# Altium footprint library MainController.PcbLib: 68 footprints (part 2 of 5)
Each footprint in its own frame and in the unit in brackets; x right, y up, seen from the top. Pads: shape width x height; smd on the part's side, far side on the other; paste and mask are expansions set on the pad; w line width, h text height; cw(c..) or ccw(c..) is an arc to the next point about the centre after c.
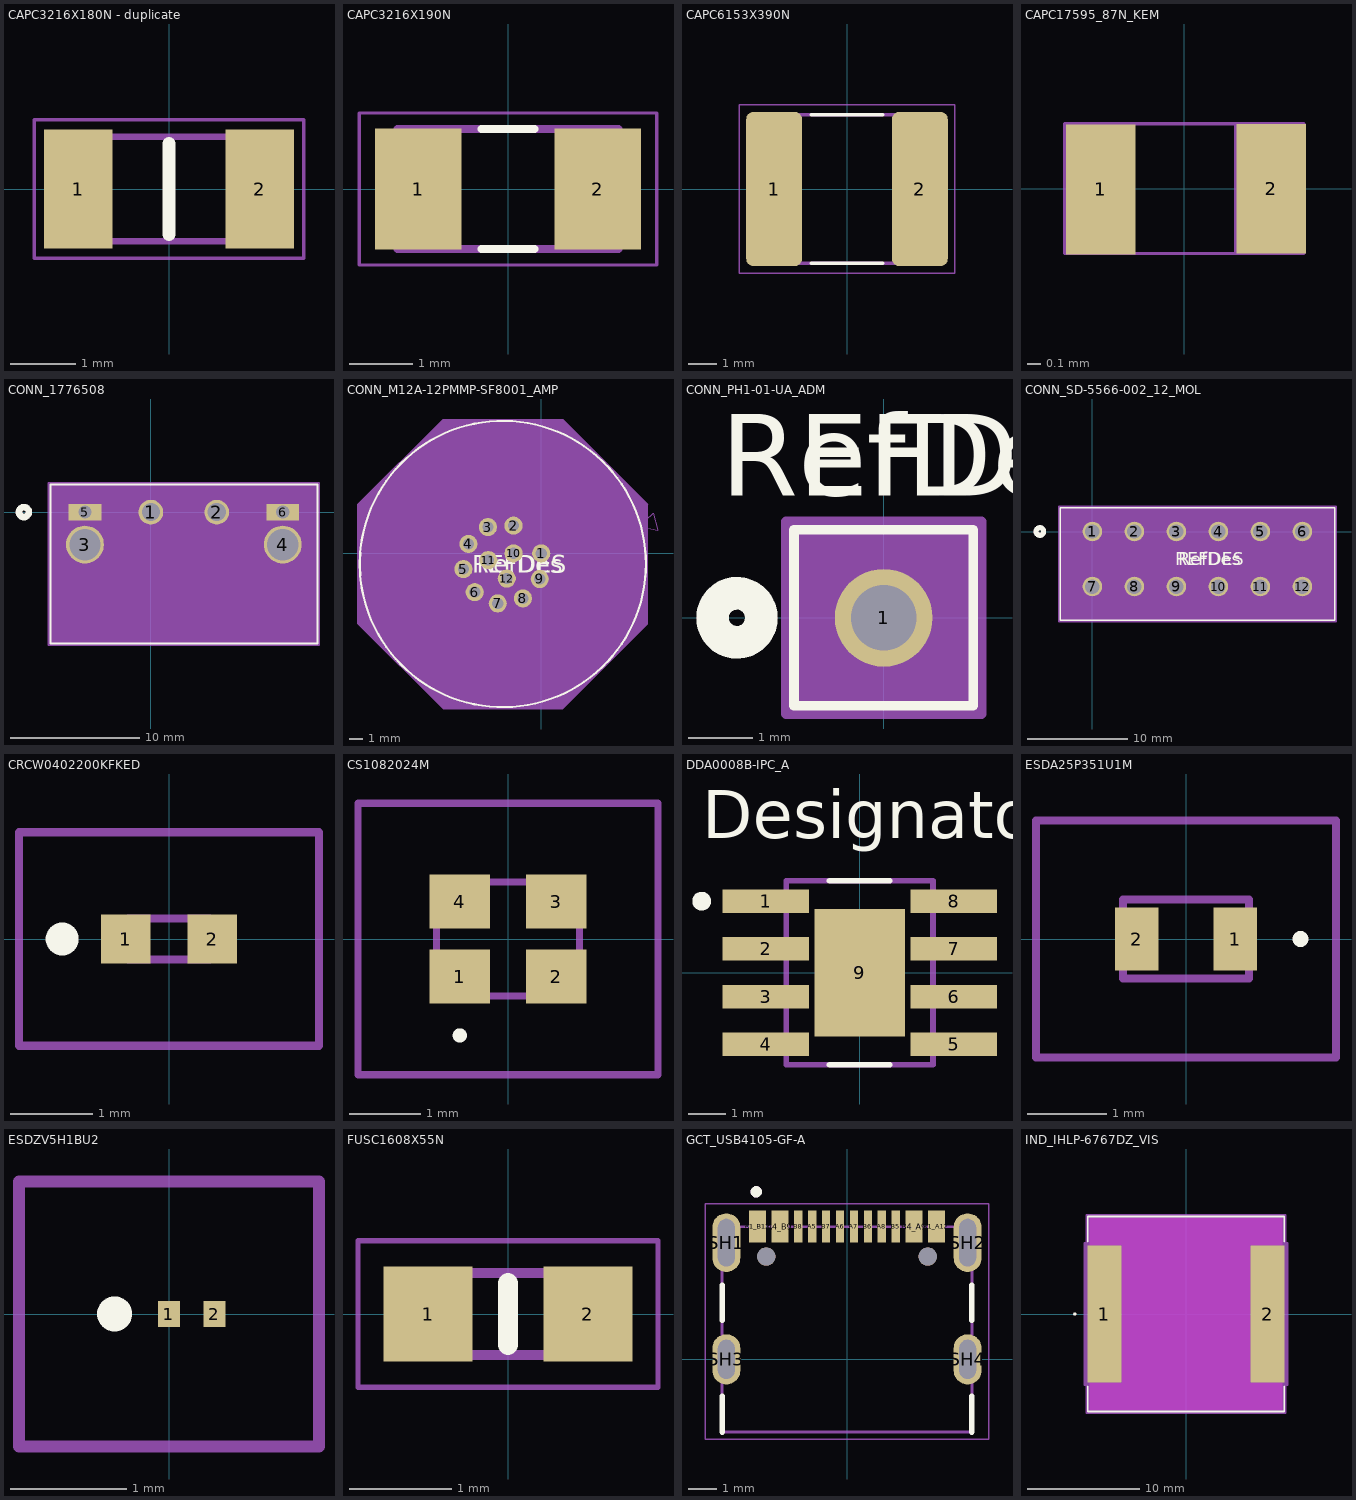
[diagram p1: the footprints below, top view; thin cyan lines are the x and y axes]

## CAPC3216X180N - duplicate [mm]
pads (2):
  rect 1.05x1.82 smd: 1(-1.39,0) 2(1.39,0)
Top Overlay:
  lines w0.2: 0,-0.7 0,0.7
Mechanical 13:
  lines w0.1: -1.6,-0.8 -1.6,0.8 1.6,0.8 1.6,-0.8 -1.6,-0.8
Mechanical 15:
  lines w0.05: -2.065,-1.06 -2.065,1.06 2.065,1.06 2.065,-1.06 -2.065,-1.06
3D body "CL31A106MAHNNNE.stp": height 1.8, standoff 0, extent -1.6,-0.8 1.6,0.8

## CAPC3216X190N [mm]
pads (2):
  rect 1.37x1.91 smd paste+0 mask+0.102: 1(-1.421,0) 2(1.421,0)
Top Overlay:
  lines w0.127: -0.42,-0.95 0.42,-0.95 ; -0.42,0.95 0.42,0.95
Mechanical 13:
  lines w0.127: -1.75,-0.95 -1.75,0.95 1.75,0.95 1.75,-0.95 -1.75,-0.95
Mechanical 15:
  lines w0.05: -2.355,-1.205 -2.355,1.205 2.355,1.205 2.355,-1.205 -2.355,-1.205
3D body "step_temp.STEP": height 1.9, standoff 0, extent -1.6,-0.8 1.6,0.8

## CAPC6153X390N [mm]
height 3.9
pads (2):
  rrect25% 2x5.52 smd: 1(-2.605,0) 2(2.605,0)
Top Overlay:
  lines w0.127: -1.285,-2.65 1.285,-2.65 ; -1.285,2.65 1.285,2.65
Mechanical 13:
  lines w0.127: -3.05,-2.65 3.05,-2.65 3.05,2.65 -3.05,2.65 -3.05,-2.65
Mechanical 15:
  lines w0.05: -3.855,-3.01 -3.855,3.01 3.855,3.01 3.855,-3.01 -3.855,-3.01
3D body "step_temp.STEP": height 3.9, standoff 0, extent -3.05,-2.65 3.05,2.65

## CAPC17595_87N_KEM [mm]
pads (2):
  rect 0.508x0.95 smd paste+0 mask+0: 1(-0.611,-0.006) 2(0.635,-0.001)
Mechanical 13:
  lines w0.025: -0.875,-0.475 -0.875,0.475 ; -0.875,-0.475 -0.375,-0.475 -0.375,0.475 -0.875,0.475 ; -0.875,-0.475 0.875,-0.475 ; -0.875,-0.475 -0.875,0.475 ; -0.875,0.475 0.875,0.475 ; 0.875,-0.475 0.375,-0.475 0.375,0.475 0.875,0.475 ; 0.875,-0.475 0.875,0.475 ; 0.875,-0.475 0.875,0.475
3D body "CAPC17595_87N_KEM.step": height 0.87, standoff 0, extent -0.863,-0.486 0.887,0.464

## CONN_1776508 [mil]
pads (6):
  round 75 hole 55 paste-99999 mask+0: 1(0,0) 2(200,0)
  round 115 hole 95 paste-99999 mask+0: 3(-200,-98.43) 4(400,-98.43)
  rect 100x50 hole 40 paste-99999 mask+0: 5(-200,0) 6(400,0)
Top Overlay:
  circle w20: c-385,0 r15
  lines w6: -305,-398.26 505,-398.26 505,83.74 -305,83.74 -305,-398.26
  text ".Designator" at -37.5,-25 h50
Bottom Overlay:
  circle w20: c-385,0 r15
Mechanical 13:
  circle w20: c0,0 r15
  lines w1: -300,-393.26 500,-393.26 500,78.74 -300,78.74 -300,-393.26
  text ".Designator" at -37.5,-25 h50
Mechanical 15:
  region: 510,88.74 -310,88.74 -310,-403.26 510,-403.26
  lines w6: -310,-403.26 -310,88.74 510,88.74 510,-403.26 -310,-403.26

## CONN_M12A-12PMMP-SF8001_AMP [mil]
pads (12):
  round 52 / inner round 60 / far side round 52 hole 32 paste-99999 mask+0: 1(0,0) 2(-79.51,79.51) 3(-153.02,75.26) 4(-208.65,27.01) 5(-223.25,-45.17) 6(-190.75,-111.24) 7(-124.68,-143.74) 8(-52.5,-129.14) 9(-4.25,-73.51) 10(-79.4,0.11) 11(-151.85,-19.3) 12(-98.81,-72.34)
Top Overlay:
  circle w6: c-110.02,-30.51 r410.5
  text "REFDES" at -197.52,-55.51 h50
  text "RefDes" at -185.02,-55.51 h50
Mechanical 13:
  circle w0: c-110.02,-30.51 r405.5
  lines w1: 280.73,77.85 334.92,66.98 321.58,115.09 280.73,77.85
  text "RefDes2" at -197.52,-55.51 h50
Mechanical 15:
  region: -525.52,140.58 -281.11,384.99 61.07,384.99 305.48,140.58 305.48,-201.6 61.07,-446.01 -281.11,-446.01 -525.52,-201.6
  lines w1: -525.52,-201.6 -525.52,140.58 -281.11,384.99 61.07,384.99 305.48,140.58 305.48,-201.6 61.07,-446.01 -281.11,-446.01 -525.52,-201.6

## CONN_PH1-01-UA_ADM [mil]
pads (1):
  round 60 hole 40 paste-99999 mask+0: 1(0,0)
Top Overlay:
  circle w20: c-90,0 r15
  lines w6: -55,-54 55,-54 55,54 -55,54 -55,-54
  text "RefDes" at -100,75 h50
  text "REFDES" at -100,75 h50
Bottom Overlay:
  circle w20: c-90,0 r15
Mechanical 13:
  circle w20: c0,0 r15
  lines w1: -50,-49 50,-49 50,49 -50,49 -50,-49
  text "RefDes2" at -100,75 h50
Mechanical 15:
  region: 60,59 -60,59 -60,-59 60,-59
  lines w6: -60,-59 -60,59 60,59 60,-59 -60,-59

## CONN_SD-5566-002_12_MOL [mil]
pads (12):
  round 77 / inner round 60 / far side round 77 hole 57 paste-99999 mask+0: 1(0,0) 2(165.35,0) 3(330.71,0) 4(496.06,0) 5(661.42,0) 6(826.77,0) 7(0,-216.54) 8(165.35,-216.54) 9(330.71,-216.54) 10(496.06,-216.54) 11(661.42,-216.54) 12(826.77,-216.54)
Top Overlay:
  circle w20: c-207.11,0 r15
  lines w6: -127.11,-349.42 953.89,-349.42 953.89,93.58 -127.11,93.58 -127.11,-349.42
  text "RefDes" at 338.39,-133.27 h50
  text "REFDES" at 325.89,-133.27 h50
Bottom Overlay:
  circle w20: c-207.11,0 r15
Mechanical 13:
  circle w20: c0,0 r15
  lines w1: -122.11,-344.42 948.89,-344.42 948.89,88.58 -122.11,88.58 -122.11,-344.42
  text "RefDes2" at 325.89,-133.27 h50
Mechanical 15:
  region: 958.89,98.58 -132.11,98.58 -132.11,-354.42 958.89,-354.42
  lines w6: -132.11,-354.42 -132.11,98.58 958.89,98.58 958.89,-354.42 -132.11,-354.42

## CRCW0402200KFKED [mm]
pads (2):
  rect 0.6x0.6 smd: 1(-0.525,0) 2(0.525,0)
Top Overlay:
  lines w0.2: -1.3,-0.1 cw(c-1.3,0) -1.3,0.1 cw(c-1.3,0) -1.3,-0.1
Mechanical 13:
  lines w0.1: -0.5,-0.25 0.5,-0.25 0.5,0.25 -0.5,0.25 -0.5,-0.25
Mechanical 15:
  lines w0.1: -1.825,-1.3 1.825,-1.3 1.825,1.3 -1.825,1.3 -1.825,-1.3
3D body "CRCW040222R0FKED.stp": height 0.35, standoff 0, extent -0.5,-0.25 0.5,0.25

## CS1082024M [mm]
pads (4):
  rect 0.85x0.75 smd: 1(-0.675,-0.525) 2(0.675,-0.525) 3(0.675,0.525) 4(-0.675,0.525)
Top Overlay:
  lines w0.1: -0.675,-1.4 cw(c-0.675,-1.35) -0.675,-1.3 cw(c-0.675,-1.35) -0.675,-1.4
Mechanical 15:
  lines w0.1: -1,-0.8 -1,0.8 1,0.8 1,-0.8 -1,-0.8
Mechanical 20:
  lines w0.1: -2.1,-1.9 -2.1,1.9 2.1,1.9 2.1,-1.9 -2.1,-1.9
3D body "CS10820-24M.stp": height 0.6, standoff 0, extent -1.015,-0.818 1.035,0.832

## DDA0008B-IPC_A [mm]
pads (9):
  rect 2.298x0.622 smd paste+0 mask+0: 1(-2.504,1.905) 2(-2.504,0.635) 3(-2.504,-0.635) 4(-2.504,-1.905) 5(2.504,-1.905) 6(2.504,-0.635) 7(2.504,0.635) 8(2.504,1.905)
  rect 2.41x3.4 smd paste-1.687 mask+0: 9(0,0)
Top Overlay:
  circle w0.25: c-4.203,1.905 r0.125
  lines w0.15: -0.804,-2.45 0.804,-2.45 ; -0.804,2.45 0.804,2.45
  text "Designator857" at -4.191,3.581 h1.27
  text ".Designator" at -5.274,3.572 h1.27
Top Paste:
  region: -0.691,1.186 -0.691,-1.186 0.691,-1.186 0.691,1.186
Mechanical 13:
  lines w0.15: -1.95,-2.45 -1.95,2.45 1.95,2.45 1.95,-2.45 -1.95,-2.45
  text ".Designator" at -5.265,3.572 h1.27

## ESDA25P351U1M [mm]
pads (2):
  rect 0.55x0.8 smd: 1(0.625,0) 2(-0.625,0)
Top Overlay:
  lines w0.1: 1.4,0 ccw(c1.45,0) 1.5,0 ccw(c1.45,0) 1.4,0
Mechanical 13:
  lines w0.1: -0.8,-0.5 -0.8,0.5 0.8,0.5 0.8,-0.5 -0.8,-0.5
Mechanical 15:
  lines w0.1: -1.9,-1.5 1.9,-1.5 1.9,1.5 -1.9,1.5 -1.9,-1.5
3D body "ESDA25P35-1U1M.stp": height 0.57, standoff 0, extent -0.8,-0.5 0.8,0.5

## ESDZV5H1BU2 [mm]
pads (2):
  rect 0.187x0.225 smd: 1(-0.001,0) 2(0.391,0)
Top Overlay:
  lines w0.2: -0.518,0.001 ccw(c-0.468,0.001) -0.418,0.001 ccw(c-0.468,0.001) -0.518,0.001
Mechanical 20:
  lines w0.1: -1.29,-1.14 -1.29,1.14 1.29,1.14 1.29,-1.14 -1.29,-1.14
3D body "ESDZV5H-1BU2.stp": height 0.37, standoff 0, extent -0.096,-0.137 0.484,0.143

## FUSC1608X55N [mm]
pads (2):
  rect 0.87x0.93 smd: 1(-0.78,0) 2(0.78,0)
Top Overlay:
  lines w0.2: 0,-0.3 0,0.3
Mechanical 15:
  lines w0.1: -0.8,-0.4 0.8,-0.4 0.8,0.4 -0.8,0.4 -0.8,-0.4
Mechanical 20:
  lines w0.05: -1.465,-0.715 1.465,-0.715 1.465,0.715 -1.465,0.715 -1.465,-0.715
3D body "SF-0603S080-2.stp": height 0.55, standoff 0, extent -0.79,-0.388 0.81,0.412

## GCT_USB4105-GF-A [mm]
height 3.31
pads (18):
  rect 0.6x1.15 smd mask+0.05: A1_B12(-3.2,4.755) A4_B9(-2.4,4.755) B1_A12(3.2,4.755) B4_A9(2.4,4.755)
  rect 0.3x1.15 smd mask+0.05: A5(-1.25,4.755) A6(-0.25,4.755) A7(0.25,4.755) A8(1.25,4.755) B5(1.75,4.755) B6(0.75,4.755) B7(-0.75,4.755) B8(-1.75,4.755)
  oval 1x2.1 hole 0.6 slot 1.7 at 90 deg: SH1(-4.32,4.18) SH2(4.32,4.18)
  oval 1x1.8 hole 0.6 slot 1.4 at 90 deg: SH3(-4.32,0) SH4(4.32,0)
  round 0.65 hole 0.65 unplated: ""(-2.89,3.68) ""(2.89,3.68)
Top Overlay:
  circle w0.2: c-3.25,6 r0.1
  lines w0.2: -4.47,-2.6 -4.47,-1.32 ; -4.47,1.4 -4.47,2.65 ; 4.47,-2.6 4.47,-1.32 ; 4.47,1.4 4.47,2.65
Mechanical 13:
  circle w0.2: c-3.25,6 r0.1
  lines w0.1: -4.47,-2.6 -4.47,4.75 4.47,4.75 4.47,-2.6 -4.47,-2.6
Mechanical 15:
  lines w0.05: -5.07,-2.85 5.07,-2.85 5.07,5.58 -5.07,5.58 -5.07,-2.85
3D body "UJ20-C-H-G-SMT-1-P16-TR.STEP": height 3.31, standoff -0.96, extent -4.431,-2.645 4.509,4.955

## IND_IHLP-6767DZ_VIS [mil]
pads (2):
  rect 119x480 smd paste+0 mask+0: 1(-286.5,0) 2(286.5,0)
Top Layer keep-out:
  region: -338,-335.5 -338,-242 338,-242 338,-335.5
  region: -338,242 -338,335.5 338,335.5 338,242
  region: -225,-242 -225,242 225,242 225,-242
Top Overlay:
  circle w6: c-390,0 r3
  lines w6: -345,-253.1 -345,-342.5 345,-342.5 345,-253.1 ; -345,253.1 -345,342.5 345,342.5 345,253.1
  text ".Designator" at -137.5,-25 h50
Keep-Out Layer:
  region: -225,-242 -225,242 225,242 225,-242
Mechanical 13:
  circle w1: c-320,0 r3
  lines w1: -340,-337.5 -340,337.5 340,337.5 340,-337.5 -340,-337.5
  text ".Designator" at -137.5,-25 h50
Mechanical 15:
  region: -350,-250 -356,-250 -356,250 -350,250 -350,347.5 350,347.5 350,250 356,250 356,-250 350,-250 350,-347.5 -350,-347.5
  lines w6: -356,-250 -350,-250 -350,-347.5 350,-347.5 350,-250 356,-250 356,250 350,250 350,347.5 -350,347.5 -350,250 -356,250 -356,-250
3D body "IND_IHLP-6767DZ_VIS.step": height 160, standoff 0, extent -340,-337.48 340,337.48